# Altium schematic symbol library IFSC2020DEER4R7M01.SchLib: 1 symbol
Pins are listed as number, name and electrical type; pins without a type are passive.

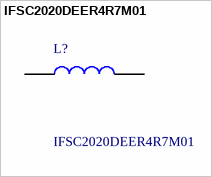
[diagram p0: symbol IFSC2020DEER4R7M01]

## IFSC2020DEER4R7M01
designator L?
4.7 H Shielded Wirewound Inductor 3 A 31mOhm Max 2424 (6060 Metric); Manufacturer_Name: Vishay; Geometry.Height: 4.5mm; Farnell Part Number: *; Farnell Price/Stock: *; Manufacturer_Part_Number: IFSC2020DEER4R7M01; Datasheet Link: https://www.vishay.com/docs/34083/ifsc-2020de-01.pdf
footprint IFSC2020DEER4R7M01
pins: 1, 2